# Altium footprint library Amin-Library.PcbLib: 601 footprints (part 20 of 38)
Each footprint in its own frame and in the unit in brackets; x right, y up, seen from the top. Pads: shape width x height; smd on the part's side, far side on the other; paste and mask are expansions set on the pad; w line width, h text height; cw(c..) or ccw(c..) is an arc to the next point about the centre after c.
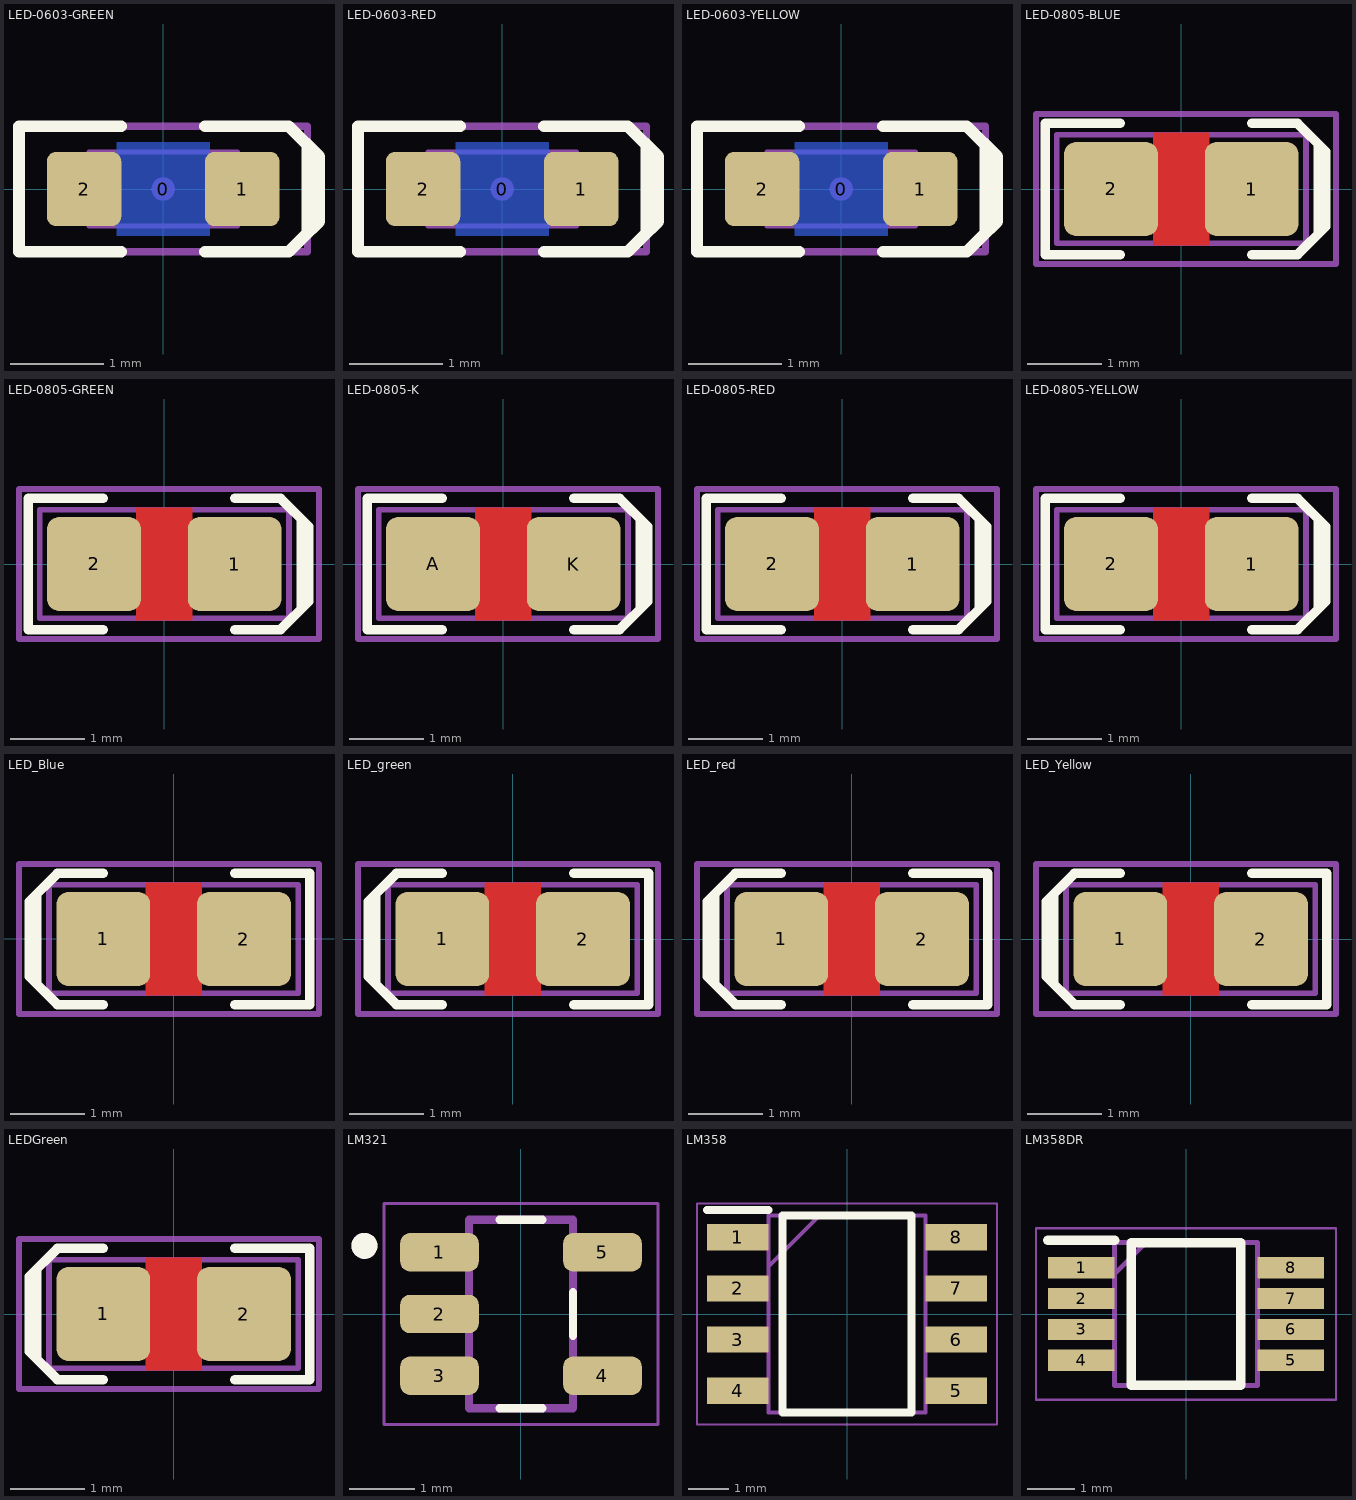
[diagram p19: the footprints below, top view; thin cyan lines are the x and y axes]

## LED-0603-GREEN [mm]
height 0.8
pads (3):
  round 0.254 on Mech15: 0(0,0)
  rrect25% 0.8x0.8 smd: 1(0.85,0) 2(-0.85,0)
Bottom Layer:
  pour cut-out: -0.5,-0.5 0.5,-0.5 0.5,0.5 -0.5,0.5
Top Overlay:
  lines w0.127: -0.45,-0.675 -1.55,-0.675 -1.55,0.675 -0.45,0.675 ; 0.45,-0.675 1.35,-0.675 1.55,-0.475 1.55,0.475 1.35,0.675 0.45,0.675 ; 1.5,-0.525 1.675,-0.35 1.675,0.35 1.525,0.5
Mechanical 13:
  lines w0.05: -0.6,0.399 0.6,0.4 0.6,-0.4 -0.6,-0.399 -0.6,0.4 ; -0.505,-0.398 -0.505,0.398 ; -0.5,-0.4 -0.8,-0.4 -0.8,0.4 -0.5,0.4 ; 0.5,-0.4 0.8,-0.4 0.8,0.4 0.5,0.4 ; 0.505,-0.398 0.505,0.398 ; -0.599,-0.398 -0.599,0.398 0.599,0.398 0.599,-0.398 -0.599,-0.398
Mechanical 15:
  lines w0.076: -1.55,-0.675 -1.55,0.675 1.55,0.675 1.55,-0.675 -1.55,-0.675
3D body "User Library-LED_0603_G.STEP": height 0.6, standoff 0, extent -0.673,-0.4 0.927,0.4

## LED-0603-RED [mm]
height 0.8
pads (3):
  round 0.254 on Mech15: 0(0,0)
  rrect25% 0.8x0.8 smd: 1(0.85,0) 2(-0.85,0)
Bottom Layer:
  pour cut-out: -0.5,-0.5 0.5,-0.5 0.5,0.5 -0.5,0.5
Top Overlay:
  lines w0.127: -0.45,-0.675 -1.55,-0.675 -1.55,0.675 -0.45,0.675 ; 0.45,-0.675 1.35,-0.675 1.55,-0.475 1.55,0.475 1.35,0.675 0.45,0.675 ; 1.5,-0.525 1.675,-0.35 1.675,0.35 1.525,0.5
Mechanical 13:
  lines w0.05: -0.6,0.399 0.6,0.4 0.6,-0.4 -0.6,-0.399 -0.6,0.4 ; -0.505,-0.398 -0.505,0.398 ; -0.5,-0.4 -0.8,-0.4 -0.8,0.4 -0.5,0.4 ; 0.5,-0.4 0.8,-0.4 0.8,0.4 0.5,0.4 ; 0.505,-0.398 0.505,0.398 ; -0.599,-0.398 0.599,-0.398 0.599,0.398 -0.599,0.398 -0.599,-0.398
Mechanical 15:
  lines w0.076: -1.55,-0.675 -1.55,0.675 1.55,0.675 1.55,-0.675 -1.55,-0.675
3D body "LED 0603 APT1608 RED.STEP": height 0.75, standoff 0, extent -0.8,-0.4 0.8,0.4

## LED-0603-YELLOW [mm]
height 0.8
pads (3):
  round 0.254 on Mech15: 0(0,0)
  rrect25% 0.8x0.8 smd: 1(0.85,0) 2(-0.85,0)
Bottom Layer:
  pour cut-out: -0.5,-0.5 0.5,-0.5 0.5,0.5 -0.5,0.5
Top Overlay:
  lines w0.127: -0.45,-0.675 -1.55,-0.675 -1.55,0.675 -0.45,0.675 ; 0.45,-0.675 1.35,-0.675 1.55,-0.475 1.55,0.475 1.35,0.675 0.45,0.675 ; 1.5,-0.525 1.675,-0.35 1.675,0.35 1.525,0.5
Mechanical 13:
  lines w0.05: -0.6,0.399 0.6,0.4 0.6,-0.4 -0.6,-0.399 -0.6,0.4 ; -0.505,-0.398 -0.505,0.398 ; -0.5,-0.4 -0.8,-0.4 -0.8,0.4 -0.5,0.4 ; 0.5,-0.4 0.8,-0.4 0.8,0.4 0.5,0.4 ; 0.505,-0.398 0.505,0.398 ; -0.599,-0.398 0.599,-0.398 0.599,0.398 -0.599,0.398 -0.599,-0.398
Mechanical 15:
  lines w0.076: -1.55,-0.675 1.55,-0.675 1.55,0.675 -1.55,0.675 -1.55,-0.675
3D body "LED 0603 APT1608 YELLOW.STEP": height 0.75, standoff 0, extent -0.8,-0.4 0.8,0.4

## LED-0805-BLUE [mil]
height 31.5
pads (2):
  rrect25% 50x50 smd: 1(37.5,0) 2(-37.5,0)
Top Layer:
  pour cut-out: -15,30 15,30 15,-30 -15,-30
Top Overlay:
  lines w5: -32.5,-35 -72.5,-35 -72.5,35 -32.5,35 ; 37.5,-35 62,-35 77,-20 77,20 62,35 37.5,35 ; 73,-24 73,24
Mechanical 13:
  lines w3: -66.5,-29 -66.5,29 66.5,29 66.5,-29 -66.5,-29
Mechanical 15:
  lines w3: -77.5,-40 -77.5,40 82.5,40 82.5,-40 -77.5,-40
3D body "everlight-17-21-0805LED-BLUE.step": height 43.81, standoff 0.11, extent -39.37,-24.6 39.37,24.61

## LED-0805-GREEN [mil]
height 31.5
pads (2):
  rrect25% 50x50 smd: 1(37.5,0) 2(-37.5,0)
Top Layer:
  pour cut-out: -15,30 15,30 15,-30 -15,-30
Top Overlay:
  lines w5: -32.5,-35 -72.5,-35 -72.5,35 -32.5,35 ; 37.5,-35 62,-35 77,-20 77,20 62,35 37.5,35 ; 73,-24 73,24
Mechanical 13:
  lines w3: -66.5,-29 66.5,-29 66.5,29 -66.5,29 -66.5,-29
Mechanical 15:
  lines w3: -77.5,-40 82.5,-40 82.5,40 -77.5,40 -77.5,-40
3D body "everlight-17-21-0805LED-GREEN.step": height 43.81, standoff 0.11, extent -37.5,-24.6 41.24,24.61

## LED-0805-K [mil]
height 31.5
pads (2):
  rrect25% 50x50 smd: A(-37.5,0) K(37.5,0)
Top Layer:
  pour cut-out: -15,30 15,30 15,-30 -15,-30
Top Overlay:
  lines w5: -32.5,-35 -72.5,-35 -72.5,35 -32.5,35 ; 37.5,-35 62,-35 77,-20 77,20 62,35 37.5,35 ; 73,-24 73,24
Mechanical 13:
  lines w3: -66.5,-29 66.5,-29 66.5,29 -66.5,29 -66.5,-29
Mechanical 15:
  lines w3: -77.5,-40 82.5,-40 82.5,40 -77.5,40 -77.5,-40
3D body: height 31.5, standoff 11.81, extent -28.65,-24.6 26.49,24.61
3D body: height 11.81, standoff 3.94, extent -39.37,-24.61 39.37,24.61
3D body: height 3.94, standoff 0, extent -39.37,-24.61 39.37,24.61
3D body: height 3.94, standoff 0, extent -11.81,-15.75 11.81,15.75

## LED-0805-RED [mil]
height 31.5
pads (2):
  rrect25% 50x50 smd: 1(37.5,0) 2(-37.5,0)
Top Layer:
  pour cut-out: -15,30 15,30 15,-30 -15,-30
Top Overlay:
  lines w5: -32.5,-35 -72.5,-35 -72.5,35 -32.5,35 ; 37.5,-35 62,-35 77,-20 77,20 62,35 37.5,35 ; 73,-24 73,24
Mechanical 13:
  lines w3: -66.5,-29 -66.5,29 66.5,29 66.5,-29 -66.5,-29
Mechanical 15:
  lines w3: -77.5,-40 -77.5,40 82.5,40 82.5,-40 -77.5,-40
3D body "everlight-17-21-0805LED-red.step": height 43.81, standoff 0.11, extent -39.37,-24.6 39.36,24.61

## LED-0805-YELLOW [mil]
height 31.5
pads (2):
  rrect25% 50x50 smd: 1(37.5,0) 2(-37.5,0)
Top Layer:
  pour cut-out: -15,30 15,30 15,-30 -15,-30
Top Overlay:
  lines w5: -32.5,-35 -72.5,-35 -72.5,35 -32.5,35 ; 37.5,-35 62,-35 77,-20 77,20 62,35 37.5,35 ; 73,-24 73,24
Mechanical 13:
  lines w3: -66.5,-29 66.5,-29 66.5,29 -66.5,29 -66.5,-29
Mechanical 15:
  lines w3: -77.5,-40 82.5,-40 82.5,40 -77.5,40 -77.5,-40
3D body "everlight-17-21-0805LED-YELLOW.step": height 43.81, standoff 0.11, extent -39.38,-24.6 39.36,24.61

## LED_Blue [mil]
pads (2):
  rrect25% 50x50 smd: 1(-37.5,0) 2(37.5,0)
Top Layer:
  pour cut-out: 15,-30 -15,-30 -15,30 15,30
Top Overlay:
  lines w5: -73,-24 -73,24 ; -37.5,-35 -62,-35 -77,-20 -77,20 -62,35 -37.5,35 ; 32.5,-35 72.5,-35 72.5,35 32.5,35
Mechanical 13:
  lines w3: -66.5,-29 66.5,-29 66.5,29 -66.5,29 -66.5,-29
Mechanical 15:
  lines w3: -82.5,-40 77.5,-40 77.5,40 -82.5,40 -82.5,-40
3D body "everlight-17-21-0805LED-BLUE.STEP": height 44.2, standoff 0.5, extent -39.37,-24.6 39.37,24.6

## LED_green [mil]
pads (2):
  rrect25% 50x50 smd: 1(-37.5,0) 2(37.5,0)
Top Layer:
  pour cut-out: 15,-30 -15,-30 -15,30 15,30
Top Overlay:
  lines w5: -73,-24 -73,24 ; -37.5,-35 -62,-35 -77,-20 -77,20 -62,35 -37.5,35 ; 32.5,-35 72.5,-35 72.5,35 32.5,35
Mechanical 13:
  lines w3: -66.5,-29 -66.5,29 66.5,29 66.5,-29 -66.5,-29
Mechanical 15:
  lines w3: -82.5,-40 -82.5,40 77.5,40 77.5,-40 -82.5,-40
3D body "User Library-LED_0603_G.STEP": height 23.62, standoff -0.08, extent -31.49,-15.74 31.51,15.76

## LED_red [mil]
pads (2):
  rrect25% 50x50 smd: 1(-37.5,0) 2(37.5,0)
Top Layer:
  pour cut-out: 15,-30 -15,-30 -15,30 15,30
Top Overlay:
  lines w5: -73,-24 -73,24 ; -37.5,-35 -62,-35 -77,-20 -77,20 -62,35 -37.5,35 ; 32.5,-35 72.5,-35 72.5,35 32.5,35
Mechanical 13:
  lines w3: -66.5,-29 -66.5,29 66.5,29 66.5,-29 -66.5,-29
Mechanical 15:
  lines w3: -82.5,-40 -82.5,40 77.5,40 77.5,-40 -82.5,-40
3D body "User Library-led0603_RED-1.STEP": height 35.43, standoff 0, extent -33.47,-17.71 33.46,17.72

## LED_Yellow [mil]
pads (2):
  rrect25% 50x50 smd: 1(-37.5,0) 2(37.5,0)
Top Layer:
  pour cut-out: 15,-30 -15,-30 -15,30 15,30
Top Overlay:
  lines w5: -73,-24 -73,24 ; -37.5,-35 -62,-35 -77,-20 -77,20 -62,35 -37.5,35 ; 32.5,-35 72.5,-35 72.5,35 32.5,35
Mechanical 13:
  lines w3: -66.5,-29 66.5,-29 66.5,29 -66.5,29 -66.5,-29
Mechanical 15:
  lines w3: -82.5,-40 77.5,-40 77.5,40 -82.5,40 -82.5,-40
3D body "everlight-17-21-0805LED-YELLOW.step": height 44.2, standoff 0.5, extent -39.37,-24.6 39.37,24.6

## LEDGreen [mil]
height 170.08
pads (2):
  rrect25% 50x50 smd: 1(-37.5,0) 2(37.5,0)
Top Layer:
  pour cut-out: 15,-30 -15,-30 -15,30 15,30
Top Overlay:
  lines w5: -73,-24 -73,24 ; -37.5,-35 -62,-35 -77,-20 -77,20 -62,35 -37.5,35 ; 32.5,-35 72.5,-35 72.5,35 32.5,35
Mechanical 13:
  lines w3: -66.5,-29 -66.5,29 66.5,29 66.5,-29 -66.5,-29
Mechanical 15:
  lines w3: -82.5,-40 -82.5,40 77.5,40 77.5,-40 -82.5,-40
3D body "User Library-LED_0603_G.STEP": height 23.62, standoff -0.08, extent -31.49,-15.74 31.51,15.76

## LM321 [mm] "SOT23-5"
height 1.91
pads (5):
  rrect50% 1.21x0.59 smd: 1(-1.255,0.95) 2(-1.255,0) 3(-1.255,-0.95) 4(1.255,-0.95) 5(1.255,0.95)
Top Overlay:
  circle w0.2: c-2.41,1.05 r0.1
  lines w0.127: -0.33,-1.45 0.33,-1.45 ; -0.33,1.45 0.33,1.45 ; 0.8,-0.335 0.8,0.335
Mechanical 13:
  circle w0.2: c-2.41,1.05 r0.1
  lines w0.127: -0.8,-1.45 0.8,-1.45 0.8,1.45 -0.8,1.45 -0.8,-1.45
Mechanical 15:
  lines w0.05: -2.11,-1.7 -2.11,1.7 2.11,1.7 2.11,-1.7 -2.11,-1.7
3D body "TPS73225DBVR--3DModel-STEP-56544.STEP": height 1.43, standoff -0.03, extent -1.4,-1.45 1.4,1.45

## LM358 [mm]
pads (8):
  rect 1.525x0.65 smd: 1(-2.712,1.905) 2(-2.712,0.635) 3(-2.712,-0.635) 4(-2.712,-1.905) 5(2.712,-1.905) 6(2.712,-0.635) 7(2.712,0.635) 8(2.712,1.905)
Top Overlay:
  lines w0.2: -3.475,2.58 -1.95,2.58 ; -1.6,-2.45 -1.6,2.45 1.6,2.45 1.6,-2.45 -1.6,-2.45
Mechanical 13:
  lines w0.1: -1.95,1.18 -0.68,2.45 ; -1.95,-2.45 -1.95,2.45 1.95,2.45 1.95,-2.45 -1.95,-2.45
Mechanical 15:
  lines w0.05: -3.725,-2.75 -3.725,2.75 3.725,2.75 3.725,-2.75 -3.725,-2.75
3D body "FR9886SOGTR.stp": height 1.75, standoff 0, extent -3,-2.45 3,2.45

## LM358DR [mm]
pads (8):
  rect 1.4x0.45 smd: 1(-2.2,0.975) 2(-2.2,0.325) 3(-2.2,-0.325) 4(-2.2,-0.975) 5(2.2,-0.975) 6(2.2,-0.325) 7(2.2,0.325) 8(2.2,0.975)
Top Overlay:
  lines w0.2: -2.9,1.55 -1.5,1.55 ; -1.15,-1.5 -1.15,1.5 1.15,1.5 1.15,-1.5 -1.15,-1.5
Mechanical 13:
  lines w0.1: -1.5,0.85 -0.85,1.5 ; -1.5,-1.5 -1.5,1.5 1.5,1.5 1.5,-1.5 -1.5,-1.5
Mechanical 15:
  lines w0.05: -3.15,-1.8 -3.15,1.8 3.15,1.8 3.15,-1.8 -3.15,-1.8
3D body "LM358DGKR.stp": height 1.1, standoff 0, extent -2.45,-1.5 2.45,1.5